# Altium footprint library RBM_ALTIUM_PCB_LIBRARY.PcbLib: 107 footprints (part 7 of 7)
Each footprint in its own frame and in the unit in brackets; x right, y up, seen from the top. Pads: shape width x height; smd on the part's side, far side on the other; paste and mask are expansions set on the pad; w line width, h text height; cw(c..) or ccw(c..) is an arc to the next point about the centre after c.
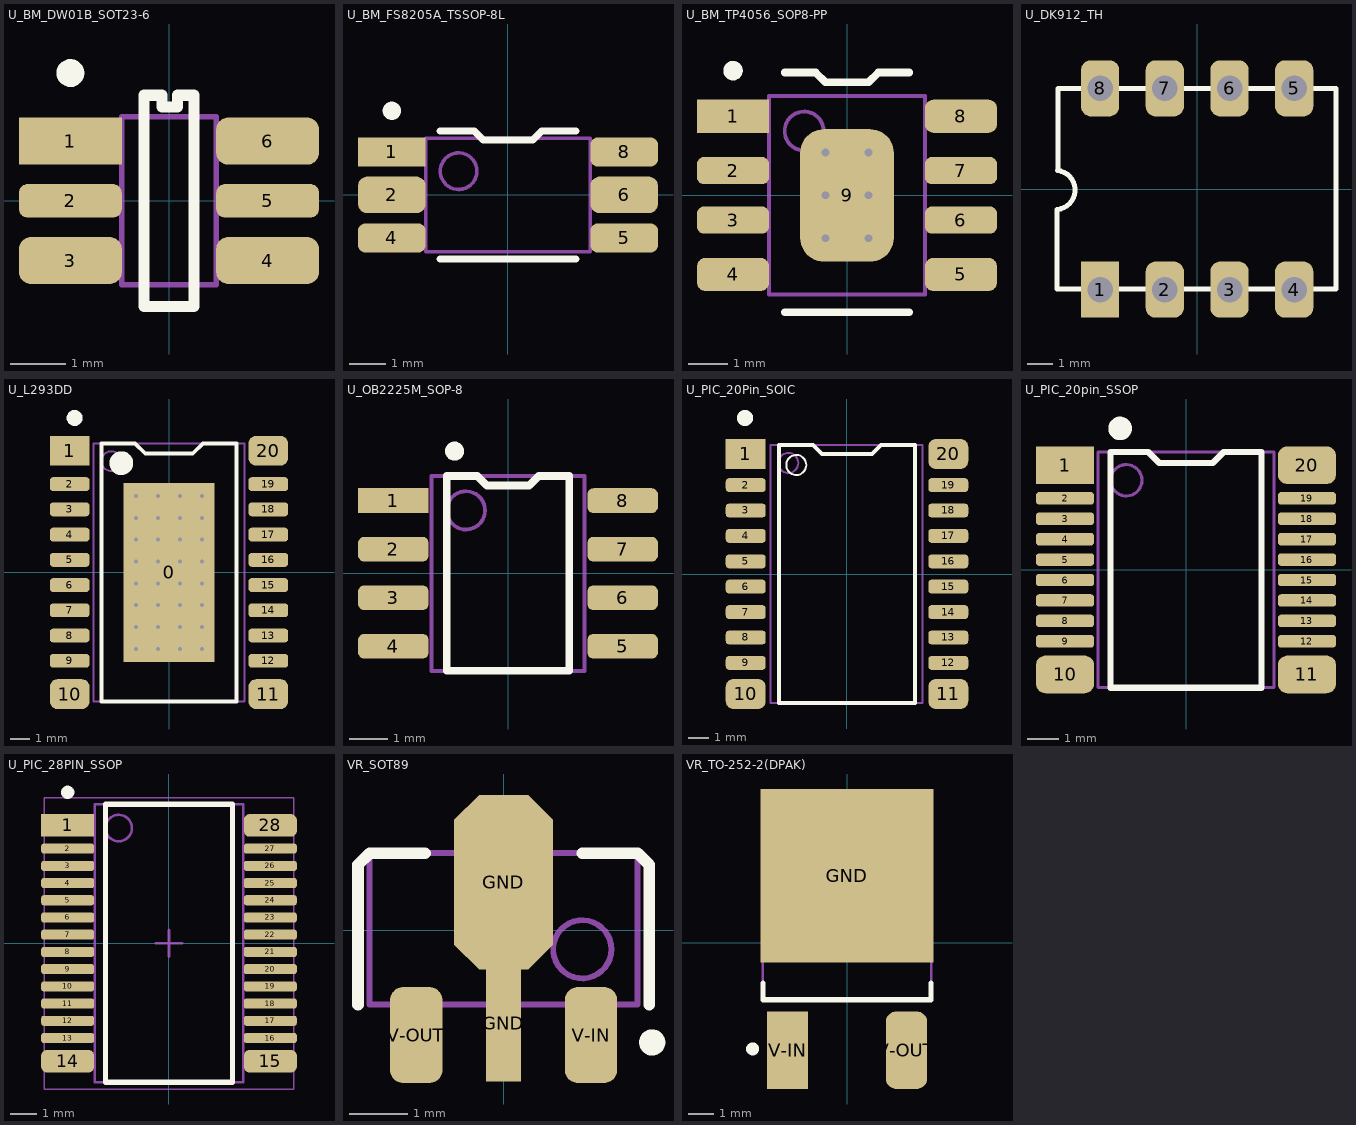
[diagram p6: the footprints below, top view; thin cyan lines are the x and y axes]

## U_BM_DW01B_SOT23-6 [mm] "SOT-23-6 Battery Protection ICs RoHS"
height 1.55
pads (6):
  rect 1.85x0.85 smd mask+0.35: 1(-1.775,1.075)
  rrect50% 1.85x0.6 smd mask+0.35: 2(-1.775,0) 5(1.775,0)
  rrect50% 1.85x0.85 smd mask+0.35: 3(-1.775,-1.075) 4(1.775,-1.075) 6(1.775,1.075)
Top Overlay:
  circle w0.25: c-1.775,2.3 r0.125
  lines w0.2: -0.45,-1.9 0.45,-1.9 0.45,1.9 0.15,1.9 0.15,1.687 -0.125,1.687 -0.125,1.9 -0.45,1.9 -0.45,-1.9
Assembly Top:
  lines w0.1: -0.85,-1.51 -0.85,1.51 0.85,1.51 0.85,-1.51 -0.85,-1.51
3D body "SOT95P245X155-6N.step": height 1.55, standoff 0, extent -1.2,-1.51 1.2,1.51

## U_BM_FS8205A_TSSOP-8L [mm] "DualN-Channel -20V 6A 1V @ 250uA 25mO @ 4A,4.5V 1W TSSOP-8_3x4.4x065P MOSFET RoHS"
height 1.2
pads (6):
  rect 1.85x0.8 smd mask+0.3: 1(-3.175,1.175)
  rrect50% 1.85x1 smd mask+0.3: 2(-3.175,0) 6(3.175,0)
  rrect50% 1.85x0.8 smd mask+0.3: 4(-3.175,-1.175) 5(3.175,-1.175) 8(3.175,1.175)
Top Overlay:
  circle w0.25: c-3.175,2.3 r0.125
  lines w0.2: -1.85,-1.75 1.85,-1.75 ; -1.85,1.75 -0.925,1.75 -0.675,1.5 0.675,1.5 0.925,1.75 1.85,1.75
Assembly Top:
  circle w0.1: c-1.35,0.65 r0.5
  lines w0.1: -2.25,-1.55 2.25,-1.55 2.25,1.55 -2.25,1.55 -2.25,-1.55
3D body "TSOP65P640X120_HS-9N.step": height 1.2, standoff 0, extent -3.2,-1.55 3.2,1.55

## U_BM_TP4056_SOP8-PP [mm] "ESOP-8 PMIC - Battery Management RoHS"
height 1.75
pads (9):
  rect 1.85x0.85 smd mask+0.4: 1(-2.925,2.03)
  rrect50% 1.85x0.7 smd mask+0.4: 2(-2.925,0.635) 3(-2.925,-0.635) 6(2.925,-0.635) 7(2.925,0.635)
  rrect50% 1.85x0.85 smd mask+0.4: 4(-2.925,-2.03) 5(2.925,-2.03) 8(2.925,2.03)
  rrect50% 2.4x3.4 smd: 9(0,0)
via 0.55,-1.1 diameter 0.5 hole 0.2
via -0.55,-1.1 diameter 0.5 hole 0.2
via 0.55,0 diameter 0.5 hole 0.2
via -0.55,0 diameter 0.5 hole 0.2
via 0.55,1.1 diameter 0.5 hole 0.2
via -0.55,1.1 diameter 0.5 hole 0.2
Top Overlay:
  circle w0.25: c-2.925,3.2 r0.125
  lines w0.2: -1.6,-3 1.6,-3 ; -1.6,3.15 -0.8,3.15 -0.55,2.9 0.55,2.9 0.8,3.15 1.6,3.15
Assembly Top:
  circle w0.1: c-1.1,1.65 r0.5
  lines w0.1: -2,-2.55 2,-2.55 2,2.55 -2,2.55 -2,-2.55
3D body "SOP127P600X175_HS-9N.step": height 1.75, standoff 0, extent -3,-2.55 3,2.55

## U_DK912_TH [mm]
pads (8):
  rect 1.5x2.2 hole 1: 1(-3.81,-3.95)
  rrect50% 1.5x2.2 hole 1: 2(-1.27,-3.95) 3(1.27,-3.95) 4(3.81,-3.95) 5(3.81,3.95) 6(1.27,3.95) 7(-1.27,3.95) 8(-3.81,3.95)
Top Overlay:
  lines w0.2: -5.5,-0.8 -5.5,-3.92 5.45,-3.92 5.45,3.95 -5.47,3.95 -5.47,0.724 ; -5.471,0.724 cw(c-5.559,-0.038) -5.47,-0.8
3D body "SW3DPS-DIP 8 IC-DEFAULT.STEP": height 5.58, standoff -3, extent -5.47,-3.92 5.45,3.95

## U_L293DD [mm] "SOIC, 20-Leads, Body 12.80x7.50mm, Pitch 1.27mm, Thermal Pad 9.00x4.60mm, IPC Medium Density"
height 2.65
pads (21):
  rect 4.6x9 smd: 0(0,0)
  rect 2x1.5 smd mask+0.3: 1(-5,6.125)
  rrect50% 2x0.7 smd mask+0.3: 2(-5,4.445) 3(-5,3.175) 4(-5,1.905) 5(-5,0.635) 6(-5,-0.635) 7(-5,-1.905) 8(-5,-3.175) 9(-5,-4.445) 12(5,-4.445) 13(5,-3.175) 14(5,-1.905) 15(5,-0.635) 16(5,0.635) 17(5,1.905) 18(5,3.175) 19(5,4.445)
  rrect50% 2x1.5 smd mask+0.3: 10(-5,-6.125) 11(5,-6.125) 20(5,6.125)
via -1.65,3.85 diameter 0.5 hole 0.2
via -0.55,3.85 diameter 0.5 hole 0.2
via 0.55,3.85 diameter 0.5 hole 0.2
via 1.65,3.85 diameter 0.5 hole 0.2
via -1.65,2.75 diameter 0.5 hole 0.2
via -0.55,2.75 diameter 0.5 hole 0.2
via 0.55,2.75 diameter 0.5 hole 0.2
via 1.65,2.75 diameter 0.5 hole 0.2
via -1.65,1.65 diameter 0.5 hole 0.2
via -0.55,1.65 diameter 0.5 hole 0.2
via 0.55,1.65 diameter 0.5 hole 0.2
via 1.65,1.65 diameter 0.5 hole 0.2
via -1.65,0.55 diameter 0.5 hole 0.2
via -0.55,0.55 diameter 0.5 hole 0.2
via 0.55,0.55 diameter 0.5 hole 0.2
via 1.65,0.55 diameter 0.5 hole 0.2
via -1.65,-0.55 diameter 0.5 hole 0.2
via -0.55,-0.55 diameter 0.5 hole 0.2
via 0.55,-0.55 diameter 0.5 hole 0.2
via 1.65,-0.55 diameter 0.5 hole 0.2
via -1.65,-1.65 diameter 0.5 hole 0.2
via -0.55,-1.65 diameter 0.5 hole 0.2
via 0.55,-1.65 diameter 0.5 hole 0.2
via 1.65,-1.65 diameter 0.5 hole 0.2
via -1.65,-2.75 diameter 0.5 hole 0.2
via -0.55,-2.75 diameter 0.5 hole 0.2
via 0.55,-2.75 diameter 0.5 hole 0.2
via 1.65,-2.75 diameter 0.5 hole 0.2
via -1.65,-3.85 diameter 0.5 hole 0.2
via -0.55,-3.85 diameter 0.5 hole 0.2
via 0.55,-3.85 diameter 0.5 hole 0.2
via 1.65,-3.85 diameter 0.5 hole 0.2
Top Overlay:
  circle w0.6: c-2.4,5.5 r0.3
  circle w0.4: c-4.75,7.775 r0.2
  lines w0.2: -3.4,-6.5 -3.4,6.5 -1.7,6.5 -1.175,5.975 1.175,5.975 1.7,6.5 3.4,6.5 3.4,-6.5 -3.4,-6.5
Assembly Top:
  circle w0.1: c-2.9,5.6 r0.5
  lines w0.1: -3.8,-6.5 -3.8,6.5 3.8,6.5 3.8,-6.5 -3.8,-6.5
Courtyard Top:
  lines w0.1: -0.5,0 0.5,0 ; 0,-0.5 0,0.5
3D body "SOIC127P1030X265_HS-21N.step": height 2.65, standoff 0, extent -5.162,-6.5 5.162,6.5

## U_OB2225M_SOP-8 [mm] "SOP-8_150mil Switching Controllers RoHS"
height 1.75
pads (8):
  rect 1.85x0.65 smd mask+0.4: 1(-3,1.905)
  rrect50% 1.85x0.65 smd mask+0.4: 2(-3,0.635) 3(-3,-0.635) 4(-3,-1.905) 5(3,-1.905) 6(3,-0.635) 7(3,0.635) 8(3,1.905)
Top Overlay:
  circle w0.25: c-1.4,3.2 r0.125
  lines w0.2: -1.6,-2.55 -1.6,2.55 -0.8,2.55 -0.55,2.3 0.55,2.3 0.8,2.55 1.6,2.55 1.6,-2.55 -1.6,-2.55
Assembly Top:
  circle w0.1: c-1.1,1.65 r0.5
  lines w0.1: -2,-2.55 -2,2.55 2,2.55 2,-2.55 -2,-2.55
3D body "SOP127P600X175_HS-9N.step": height 1.75, standoff 0, extent -3,-2.55 3,2.55

## U_PIC_20Pin_SOIC [mm] "SOIC, 20-Leads, Body 12.80x7.50mm, Pitch 1.27mm, IPC Medium Density"
height 2.65
pads (20):
  rect 2x1.5 smd mask+0.3: 1(-5.063,6)
  rrect50% 2x0.7 smd mask+0.3: 2(-5.063,4.445) 3(-5.063,3.175) 4(-5.063,1.905) 5(-5.063,0.635) 6(-5.063,-0.635) 7(-5.063,-1.905) 8(-5.063,-3.175) 9(-5.063,-4.445) 12(5.063,-4.445) 13(5.063,-3.175) 14(5.063,-1.905) 15(5.063,-0.635) 16(5.063,0.635) 17(5.063,1.905) 18(5.063,3.175) 19(5.063,4.445)
  rrect50% 2x1.5 smd mask+0.3: 10(-5.063,-6) 11(5.063,-6)
  rrect50% 2x1.5 smd paste+0 mask+0.3: 20(5.063,6)
Top Overlay:
  circle w0.1: c-2.537,5.45 r0.5
  circle w0.4: c-5.1,7.8 r0.2
  lines w0.2: -3.4,-6.45 3.4,-6.45 3.4,6.45 1.7,6.45 1.25,6 -1.25,6 -1.7,6.45 -3.4,6.45 -3.4,-6.45
Mechanical 13:
  circle w0.1: c-2.937,5.55 r0.5
  lines w0.1: -3.837,-6.45 3.763,-6.45 3.763,6.45 -3.837,6.45 -3.837,-6.45
3D body "SOIC127P1020X265-20N.step": height 2.65, standoff 0, extent -5.062,-6.425 5.088,6.475

## U_PIC_20pin_SSOP [mm] "SOP, 20-Leads, Body 7.20x5.30mm, Pitch 0.65mm, IPC Medium Density"
height 2
pads (20):
  rect 1.85x1.2 smd mask+0.2: 1(-3.85,3.33)
  rrect50% 1.85x0.395 smd mask+0.2: 2(-3.85,2.275) 3(-3.85,1.625) 4(-3.85,0.975) 5(-3.85,0.325) 6(-3.85,-0.325) 7(-3.85,-0.975) 8(-3.85,-1.625) 9(-3.85,-2.275) 12(3.85,-2.275) 13(3.85,-1.625) 14(3.85,-0.975) 15(3.85,-0.325) 16(3.85,0.325) 17(3.85,0.975) 18(3.85,1.625) 19(3.85,2.275)
  rrect50% 1.85x1.2 smd mask+0.2: 10(-3.85,-3.33) 11(3.85,-3.33) 20(3.85,3.33)
Top Overlay:
  circle w0.5: c-2.1,4.5 r0.125
  lines w0.2: -2.4,-3.75 -2.4,3.75 -1.2,3.75 -0.85,3.4 0.85,3.4 1.2,3.75 2.4,3.75 2.4,-3.75 -2.4,-3.75
Mechanical 13:
  circle w0.1: c-1.9,2.85 r0.5
  lines w0.1: -2.8,-3.75 -2.8,3.75 2.8,3.75 2.8,-3.75 -2.8,-3.75
3D body "SOP65P780X200-20N.step": height 2, standoff 0, extent -3.9,-3.75 3.9,3.75

## U_PIC_28PIN_SSOP [mm] "SOP, 28-Leads, Body 10.20x5.30mm, Pitch 0.65mm, Thermal Pad 8.00x4.00mm, IPC Medium Density"
height 2
pads (28):
  rect 2x0.85 smd mask+0.2: 1(-3.825,4.45)
  rrect50% 2x0.38 smd mask+0.2: 2(-3.825,3.575) 3(-3.825,2.925) 4(-3.825,2.275) 5(-3.825,1.625) 6(-3.825,0.975) 7(-3.825,0.325) 8(-3.825,-0.325) 9(-3.825,-0.975) 10(-3.825,-1.625) 11(-3.825,-2.275) 12(-3.825,-2.925) 13(-3.825,-3.575) 16(3.825,-3.575) 17(3.825,-2.925) 18(3.825,-2.275) 19(3.825,-1.625) 20(3.825,-0.975) 21(3.825,-0.325) 22(3.825,0.325) 23(3.825,0.975) 24(3.825,1.625) 25(3.825,2.275) 26(3.825,2.925) 27(3.825,3.575)
  rrect50% 2x0.85 smd mask+0.2: 14(-3.825,-4.45) 15(3.825,-4.45) 28(3.825,4.45)
Top Overlay:
  circle w0.25: c-3.825,5.7 r0.125
  lines w0.2: -2.4,-5.25 2.4,-5.25 2.4,5.25 -2.4,5.25 -2.4,-5.25
Assembly Top:
  circle w0.1: c-1.9,4.35 r0.5
  lines w0.1: -2.8,-5.25 2.8,-5.25 2.8,5.25 -2.8,5.25 -2.8,-5.25
Courtyard Top:
  lines w0.05: -4.7,-5.5 4.7,-5.5 4.7,5.5 -4.7,5.5 -4.7,-5.5
  lines w0.1: -0.5,0 0.5,0 ; 0,-0.5 0,0.5
3D body "U_PIC16F18856_SSOP.step": height 2, standoff 0, extent -3.9,-5.25 3.9,5.25

## VR_SOT89 [mm] "SOT89, 3-Leads, Body 4.50x2.45mm, Pitch 1.50mm, Lead Span 4.1mm - Reverse Pinning, IPC Medium Density"
height 1.6
pads (4):
  rect 0.6x2 smd: GND(0,-1.6)
  oct 1.7x3 smd: GND(0,0.823)
  rrect50% 0.9x1.65 smd: V-IN(1.5,-1.8) V-OUT(-1.5,-1.8)
Top Overlay:
  circle w0.25: c2.55,-1.927 r0.1
  lines w0.2: -2.5,-1.277 -2.5,1.123 -2.3,1.323 -1.35,1.323 ; 1.35,1.323 2.3,1.323 2.5,1.123 2.5,-1.277
Mechanical 13:
  circle w0.1: c1.35,-0.327 r0.5
  lines w0.1: -2.3,-1.277 2.3,-1.277 2.3,1.323 -2.3,1.323 -2.3,-1.277
3D body "SOT89R-150P410X160-3N.step": height 1.6, standoff 0, extent -2.3,-2.2 2.3,1.8

## VR_TO-252-2(DPAK) [mm] "D-PAK, 3-Pads, Body 6.20x6.61mm (max), IPC Medium Density"
height 2.4
pads (3):
  rect 6.7x6.7 smd: GND(0,2.6)
  rect 1.6x3 smd: V-IN(-2.3,-4.15)
  rrect50% 1.6x3 smd: V-OUT(2.3,-4.15)
Top Overlay:
  circle w0.25: c-3.65,-4.1 r0.125
  lines w0.2: -3.25,-1.55 -3.25,-2.2 3.25,-2.2 3.25,-1.55
Mechanical 13:
  lines w0.1: -3.25,-2.2 -3.25,4 3.25,4 3.25,-2.2 -3.25,-2.2
3D body "ST7805.step": height 2.5, standoff 0, extent -3.25,-4.275 3.25,5.45